# Altium footprint library Footprint-Lib-PhilsLab.PcbLib: 352 footprints (part 21 of 22)
Each footprint in its own frame and in the unit in brackets; x right, y up, seen from the top. Pads: shape width x height; smd on the part's side, far side on the other; paste and mask are expansions set on the pad; w line width, h text height; cw(c..) or ccw(c..) is an arc to the next point about the centre after c.
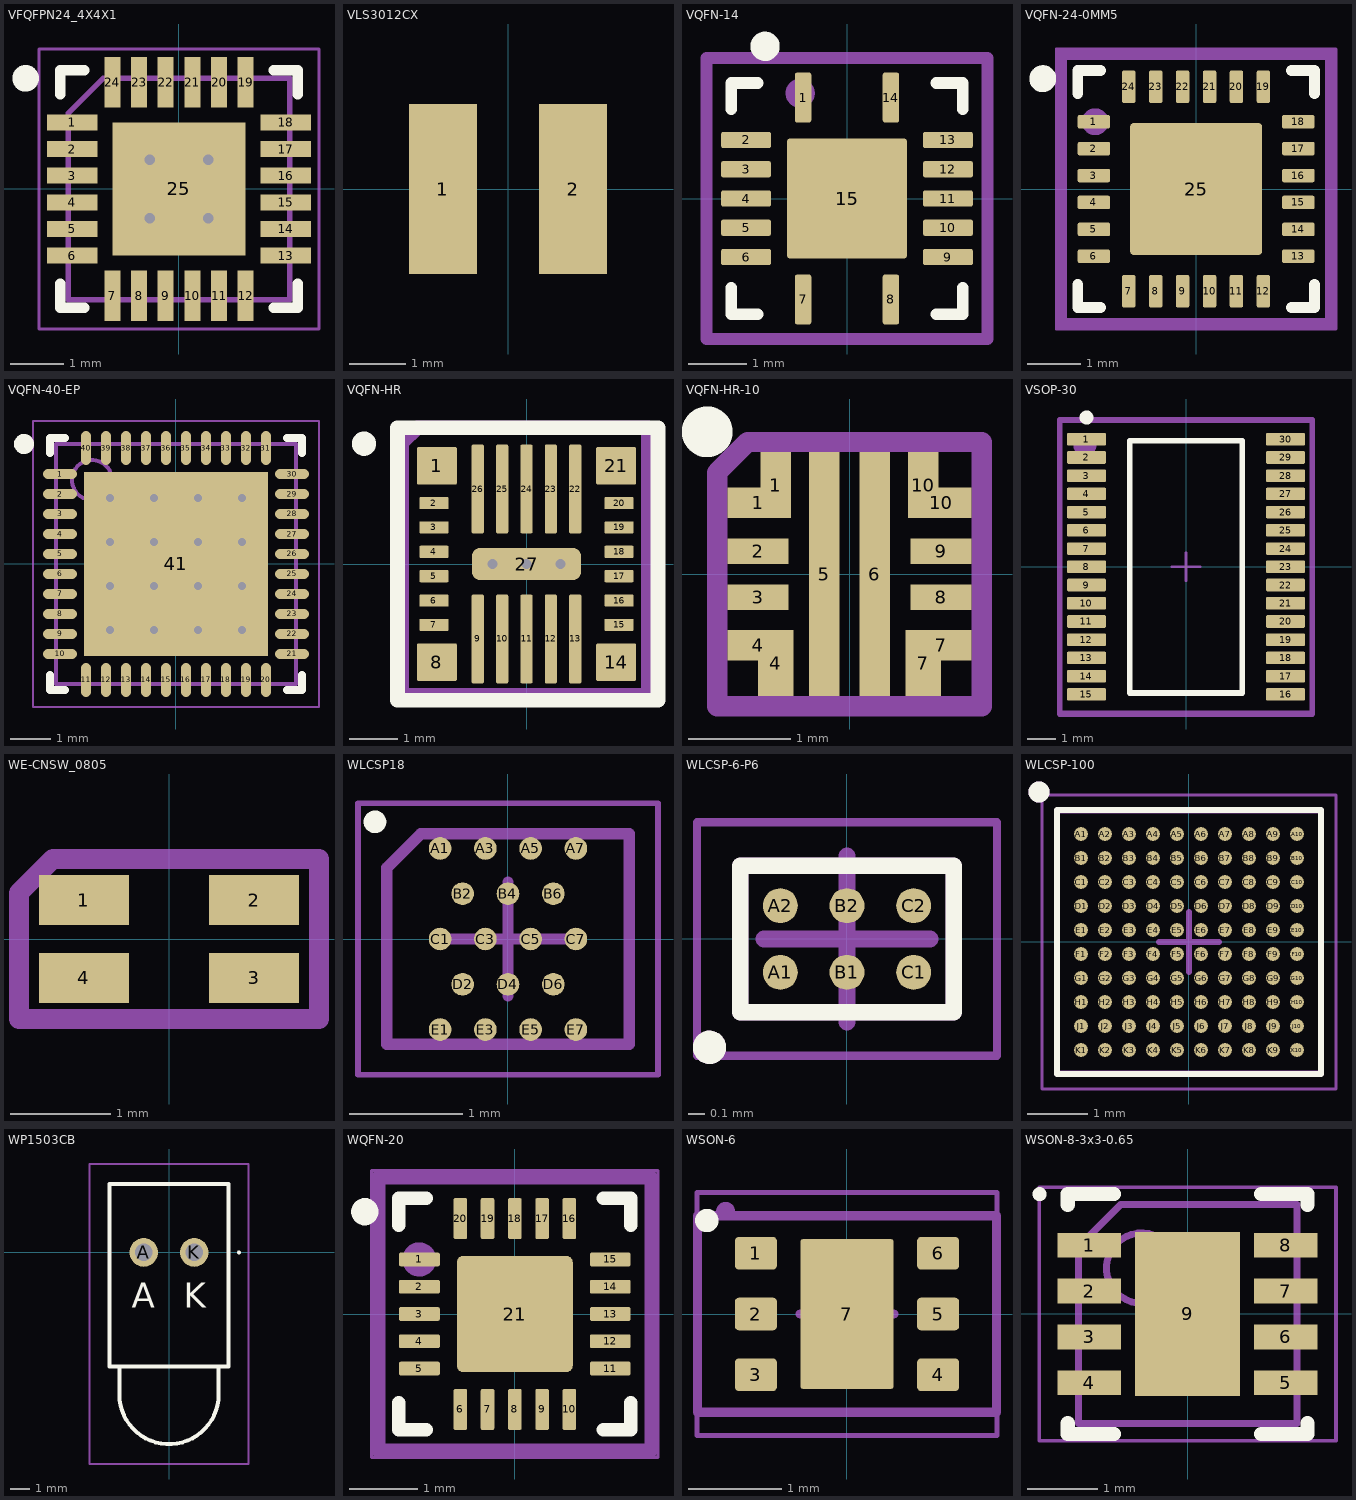
[diagram p20: the footprints below, top view; thin cyan lines are the x and y axes]

## VFQFPN24_4X4X1 [mm] "QFN, 24-Leads, Body 4,00x4,00mm, Pitch 0,50mm, Thermal Pad 2,50x2,50mm, IPC Medium Density"
height 1
pads (25):
  rect 0.95x0.3 smd mask+0.07: 1(-2,1.25) 2(-2,0.75) 3(-2,0.25) 4(-2,-0.25) 5(-2,-0.75) 6(-2,-1.25) 13(2,-1.25) 14(2,-0.75) 15(2,-0.25) 16(2,0.25) 17(2,0.75) 18(2,1.25)
  rect 0.3x0.95 smd mask+0.07: 7(-1.25,-2) 8(-0.75,-2) 9(-0.25,-2) 10(0.25,-2) 11(0.75,-2) 12(1.25,-2) 19(1.25,2) 20(0.75,2) 21(0.25,2) 22(-0.25,2) 23(-0.75,2) 24(-1.25,2)
  rect 2.5x2.5 smd mask+0.102: 25(0,0)
via -0.55,0.55 diameter 0.5 hole 0.2
via 0.55,0.55 diameter 0.5 hole 0.2
via -0.55,-0.55 diameter 0.5 hole 0.2
via 0.55,-0.55 diameter 0.5 hole 0.2
Top Overlay:
  circle w0.25: c-2.875,2.075 r0.125
  lines w0.2: -2.225,-1.775 -2.225,-2.225 -1.775,-2.225 ; -2.225,1.775 -2.225,2.225 -1.775,2.225 ; 1.775,-2.225 2.225,-2.225 2.225,-1.775 ; 1.775,2.225 2.225,2.225 2.225,1.775
Mechanical 13:
  lines w0.1: -2.075,-2.075 -2.075,1.425 -1.425,2.075 2.075,2.075 2.075,-2.075 -2.075,-2.075
Mechanical 15:
  lines w0.05: -2.625,-2.625 -2.625,2.625 2.625,2.625 2.625,-2.625 -2.625,-2.625
  lines w0.1: -0.5,0 0.5,0 ; 0,-0.5 0,0.5
3D body "VFQFPN24_4X4X1.step": height 0.99, standoff 0, extent -2.07,-2.07 2.07,2.07

## VLS3012CX [mm]
pads (2):
  rect 1.2x3 smd: 1(-1.15,0) 2(1.15,0)
3D body "vls3012cx-1.step": height 1.21, standoff 0.01, extent -1.502,-1.509 1.502,1.509

## VQFN-14 [mm] "QFN, 14-Leads, Body 3.50x3.50mm, Pitch 0.50mm, Thermal Pad 2.00x2.00mm, IPC Medium Density"
height 1
pads (15):
  rrect25% 0.28x0.85 smd: 1(-0.75,1.725) 7(-0.75,-1.725) 8(0.75,-1.725) 14(0.75,1.725)
  rrect25% 0.85x0.28 smd: 2(-1.725,1) 3(-1.725,0.5) 4(-1.725,0) 5(-1.725,-0.5) 6(-1.725,-1) 9(1.725,-1) 10(1.725,-0.5) 11(1.725,0) 12(1.725,0.5) 13(1.725,1)
  rrect5% 2.05x2.05 smd: 15(0,0)
Top Overlay:
  circle w0.25: c-1.4,2.6 r0.125
  lines w0.2: -1.975,-1.525 -1.975,-1.975 -1.525,-1.975 ; -1.975,1.525 -1.975,1.975 -1.525,1.975 ; 1.525,-1.975 1.975,-1.975 1.975,-1.525 ; 1.525,1.975 1.975,1.975 1.975,1.525
Mechanical 13:
  circle w0.25: c-0.8,1.8 r0.125
  lines w0.2: -2.4,-2.4 -2.4,2.4 2.4,2.4 2.4,-2.4 -2.4,-2.4
  text ".Designator" at -4.998,-0.333 h1
Mechanical 15:
  lines w0.05: -2.375,-2.375 -2.375,2.375 2.375,2.375 2.375,-2.375 -2.375,-2.375
  lines w0.1: -0.5,0 0.5,0 ; 0,-0.5 0,0.5
3D body "SN74LVC125ARGYR.stp": height 0.97, standoff 0, extent -1.75,-1.75 1.75,1.75

## VQFN-24-0MM5 [mm]
height 1
pads (25):
  rrect25% 0.6x0.25 smd mask+0.07: 1(-1.9,1.25) 2(-1.9,0.75) 3(-1.9,0.25) 4(-1.9,-0.25) 5(-1.9,-0.75) 6(-1.9,-1.25) 13(1.9,-1.25) 14(1.9,-0.75) 15(1.9,-0.25) 16(1.9,0.25) 17(1.9,0.75) 18(1.9,1.25)
  rrect25% 0.25x0.6 smd mask+0.07: 7(-1.25,-1.9) 8(-0.75,-1.9) 9(-0.25,-1.9) 10(0.25,-1.9) 11(0.75,-1.9) 12(1.25,-1.9) 19(1.25,1.9) 20(0.75,1.9) 21(0.25,1.9) 22(-0.25,1.9) 23(-0.75,1.9) 24(-1.25,1.9)
  rrect5% 2.45x2.45 smd: 25(0,0)
Top Overlay:
  circle w0.25: c-2.85,2.05 r0.125
  lines w0.2: -2.2,-1.775 -2.2,-2.2 -1.775,-2.2 ; -2.2,1.775 -2.2,2.2 -1.775,2.2 ; 1.775,-2.2 2.2,-2.2 2.2,-1.775 ; 1.775,2.2 2.2,2.2 2.2,1.775
Mechanical 13:
  circle w0.25: c-1.875,1.25 r0.125
  lines w0.2: -2.5,-2.5 -2.5,2.5 2.5,2.5 2.5,-2.5 -2.5,-2.5
  text "'.Designator'" at -5.665,-0.417 h1
Mechanical 15:
  lines w0.05: -2.6,-2.6 -2.6,2.6 2.6,2.6 2.6,-2.6 -2.6,-2.6
  lines w0.1: -0.5,0 0.5,0 ; 0,-0.5 0,0.5
3D body "VQFN-24-0MM5.step": height 1, standoff 0, extent -2.051,-2.051 2.051,2.051

## VQFN-40-EP [mm]
height 0.9
pads (41):
  oval 0.85x0.25 smd mask+0.2: 1(-2.9,2.25) 2(-2.9,1.75) 3(-2.9,1.25) 4(-2.9,0.75) 5(-2.9,0.25) 6(-2.9,-0.25) 7(-2.9,-0.75) 8(-2.9,-1.25) 9(-2.9,-1.75) 10(-2.9,-2.25) 21(2.9,-2.25) 22(2.9,-1.75) 23(2.9,-1.25) 24(2.9,-0.75) 25(2.9,-0.25) 26(2.9,0.25) 27(2.9,0.75) 28(2.9,1.25) 29(2.9,1.75) 30(2.9,2.25)
  oval 0.25x0.85 smd mask+0.2: 11(-2.25,-2.9) 12(-1.75,-2.9) 13(-1.25,-2.9) 14(-0.75,-2.9) 15(-0.25,-2.9) 16(0.25,-2.9) 17(0.75,-2.9) 18(1.25,-2.9) 19(1.75,-2.9) 20(2.25,-2.9) 31(2.25,2.9) 32(1.75,2.9) 33(1.25,2.9) 34(0.75,2.9) 35(0.25,2.9) 36(-0.25,2.9) 37(-0.75,2.9) 38(-1.25,2.9) 39(-1.75,2.9) 40(-2.25,2.9)
  rect 4.6x4.6 smd mask+0.2: 41(0,0)
via 1.65,-1.65 diameter 0.5 hole 0.2
via 0.55,-1.65 diameter 0.5 hole 0.2
via -0.55,-1.65 diameter 0.5 hole 0.2
via -1.65,-1.65 diameter 0.5 hole 0.2
via 1.65,-0.55 diameter 0.5 hole 0.2
via 0.55,-0.55 diameter 0.5 hole 0.2
via -0.55,-0.55 diameter 0.5 hole 0.2
via -1.65,-0.55 diameter 0.5 hole 0.2
via 1.65,0.55 diameter 0.5 hole 0.2
via 0.55,0.55 diameter 0.5 hole 0.2
via -0.55,0.55 diameter 0.5 hole 0.2
via -1.65,0.55 diameter 0.5 hole 0.2
via 1.65,1.65 diameter 0.5 hole 0.2
via 0.55,1.65 diameter 0.5 hole 0.2
via -0.55,1.65 diameter 0.5 hole 0.2
via -1.65,1.65 diameter 0.5 hole 0.2
Top Overlay:
  circle w0.25: c-3.8,3 r0.125
  lines w0.2: -3.15,-2.775 -3.15,-3.15 -2.775,-3.15 ; -3.15,2.775 -3.15,3.15 -2.775,3.15 ; 2.775,-3.15 3.15,-3.15 3.15,-2.775 ; 2.775,3.15 3.15,3.15 3.15,2.775
Mechanical 13:
  circle w0.1: c-2.1,2.1 r0.5
  lines w0.1: -3,-3 3,-3 3,3 -3,3 -3,-3
  text "'.Designator'" at -6.315,-1.4 h1
Mechanical 15:
  lines w0.05: -3.575,-3.575 3.575,-3.575 3.575,3.575 -3.575,3.575 -3.575,-3.575
  lines w0.1: -0.5,0 0.5,0 ; 0,-0.5 0,0.5
3D body "VQFN-40-EP.step": height 0.9, standoff 0, extent -3.001,-3.001 3.001,3.001

## VQFN-HR [mm]
pads (27):
  rrect10% 0.825x0.775 smd mask+0.07: 1(-1.84,2.015) 8(-1.84,-2.015) 14(1.84,-2.015) 21(1.84,2.015)
  rrect20% 0.6x0.25 smd mask+0.07: 2(-1.9,1.25) 3(-1.9,0.75) 4(-1.9,0.25) 5(-1.9,-0.25) 6(-1.9,-0.75) 7(-1.9,-1.25) 15(1.9,-1.25) 16(1.9,-0.75) 17(1.9,-0.25) 18(1.9,0.25) 19(1.9,0.75) 20(1.9,1.25)
  rrect20% 0.25x1.82 smd mask+0.07: 9(-1,-1.54) 10(-0.5,-1.54) 11(0,-1.54) 12(0.5,-1.54) 13(1,-1.54) 22(1,1.54) 23(0.5,1.54) 24(0,1.54) 25(-0.5,1.54) 26(-1,1.54)
  rrect50% 2.24x0.66 smd mask+0.07: 27(0,0)
via 0,0 diameter 0.5 hole 0.2
via -0.7,0 diameter 0.5 hole 0.2
via 0.7,0 diameter 0.5 hole 0.2
Top Overlay:
  circle w0.254: c-3.339,2.47 r0.121
  lines w0.3: -2.65,-2.8 -2.65,2.8 2.7,2.8 2.7,-2.8 -2.65,-2.8
Mechanical 13:
  circle w0.254: c-1.85,2.021 r0.117
  lines w0.3: -2.559,-2.7 -2.559,2.487 -2.247,2.8 2.5,2.8 2.5,-2.7 -2.559,-2.7
  text "'.Designator'" at -5.84,-0.925 h1
3D body "VQFN-HR.stp": height 0.9, standoff 0, extent -2,-2.25 2,2.25

## VQFN-HR-10 [mm]
pads (14):
  rect 0.6x0.3 smd: 1(-0.9,0.7) 4(-0.9,-0.7) 7(0.9,-0.7) 10(0.9,0.7)
  rect 0.3x0.65 smd: 1(-0.725,0.875) 10(0.725,0.875)
  rect 0.6x0.25 smd: 2(-0.9,0.225) 3(-0.9,-0.225) 8(0.9,-0.225) 9(0.9,0.225)
  rect 0.35x0.65 smd: 4(-0.725,-0.875) 7(0.725,-0.875)
  rect 0.3x2.4 smd: 5(-0.25,0) 6(0.25,0)
Top Overlay:
  circle w0.3: c-1.4,1.4 r0.1
Mechanical 13:
  lines w0.2: -1.3,-1.3 1.3,-1.3 1.3,1.3 -1,1.3 -1.3,1 -1.3,0.2 -1.3,-1.3
  text "'.Designator'" at -6.315,-1.4 h1
3D body "VQFN-HR-10P.STEP": height 1.01, standoff -0.01, extent -1.05,-1.05 1.05,1.05

## VSOP-30 [mm]
height 1.3
pads (30):
  rrect25% 1.4x0.45 smd mask+0.15: 1(-3.55,4.55) 2(-3.55,3.9) 3(-3.55,3.25) 4(-3.55,2.6) 5(-3.55,1.95) 6(-3.55,1.3) 7(-3.55,0.65) 8(-3.55,0) 9(-3.55,-0.65) 10(-3.55,-1.3) 11(-3.55,-1.95) 12(-3.55,-2.6) 13(-3.55,-3.25) 14(-3.55,-3.9) 15(-3.55,-4.55) 16(3.55,-4.55) 17(3.55,-3.9) 18(3.55,-3.25) 19(3.55,-2.6) 20(3.55,-1.95) 21(3.55,-1.3) 22(3.55,-0.65) 23(3.55,0) 24(3.55,0.65) 25(3.55,1.3) 26(3.55,1.95) 27(3.55,2.6) 28(3.55,3.25) 29(3.55,3.9) 30(3.55,4.55)
Top Overlay:
  circle w0.25: c-3.55,5.325 r0.125
  lines w0.2: -2,-4.5 2,-4.5 2,4.5 -2,4.5 -2,-4.5
Mechanical 13:
  circle w0.5: c-3.608,4.351 r0.16
  lines w0.2: -4.5,-5.25 4.5,-5.25 4.5,5.25 -4.5,5.25 -4.5,-5.25
  text "'.Designator'" at -5.815,-0.9 h1
Mechanical 15:
  lines w0.05: -4.5,-5.15 4.5,-5.15 4.5,5.15 -4.5,5.15 -4.5,-5.15
  lines w0.1: -0.5,0 0.5,0 ; 0,-0.5 0,0.5
3D body "VSOP-30.step": height 1.3, standoff 0, extent -3.8,-4.9 3.8,4.9

## WE-CNSW_0805 [mm]
pads (4):
  rect 0.9x0.5 smd mask+0.05: 1(-0.85,0.39) 2(0.85,0.39) 3(0.85,-0.39) 4(-0.85,-0.39)
Mechanical 13:
  lines w0.2: -1.5,-0.8 -1.5,0.462 -1.162,0.8 1.5,0.8 1.5,-0.8 -1.5,-0.8
  text "'.Designator'" at -5.815,-0.9 h1
3D body "WE-CNSW_0805.stp": height 1.21, standoff 0.01, extent -1,-0.6 1,0.6

## WLCSP18 [mm]
height 0.59
pads (18):
  round 0.2 smd mask+0.03: A1(-0.6,0.8) A3(-0.2,0.8) A5(0.2,0.8) A7(0.6,0.8) B2(-0.4,0.4) B4(0,0.4) B6(0.4,0.4) C1(-0.6,0) C3(-0.2,0) C5(0.2,0) C7(0.6,0) D2(-0.4,-0.4) D4(0,-0.4) D6(0.4,-0.4) E1(-0.6,-0.8) E3(-0.2,-0.8) E5(0.2,-0.8) E7(0.6,-0.8)
Top Overlay:
  circle w0.1: c-1.175,1.035 r0.05
Mechanical 13:
  lines w0.1: -1.07,-0.93 -1.07,0.63 -0.77,0.93 1.07,0.93 1.07,-0.93 -1.07,-0.93
  text "'.Designator'" at -5.815,-0.9 h1
Mechanical 15:
  lines w0.05: -1.325,-1.2 1.325,-1.2 1.325,1.2 -1.325,1.2 -1.325,-1.2
  lines w0.1: -0.5,0 0.5,0 ; 0,-0.5 0,0.5
3D body "WLCSP18.step": height 0.59, standoff 0, extent -1.07,-0.93 1.07,0.93

## WLCSP-6-P6 [mm]
height 0.69
pads (6):
  round 0.21 smd mask+0.04: A1(-0.4,-0.2) A2(-0.4,0.2) B1(0,-0.2) B2(0,0.2) C1(0.4,-0.2) C2(0.4,0.2)
Top Overlay:
  circle w0.1: c-0.825,-0.65 r0.05
  lines w0.1: -0.64,-0.44 -0.64,0.44 0.64,0.44 0.64,-0.44 -0.64,-0.44
Mechanical 13:
  circle w0.1: c-0.825,-0.65 r0.05
  lines w0.1: -0.64,-0.44 0.64,-0.44 0.64,0.44 -0.64,0.44 -0.64,-0.44
  text "'.Designator'" at -5.665,-0.417 h1
Mechanical 15:
  lines w0.05: -0.9,-0.7 0.9,-0.7 0.9,0.7 -0.9,0.7 -0.9,-0.7
  lines w0.1: -0.5,0 0.5,0 ; 0,-0.5 0,0.5
3D body "WLCSP-6-P6.step": height 0.69, standoff 0, extent -0.64,-0.44 0.64,0.44

## WLCSP-100 [mm]
height 0.59
pads (100):
  round 0.23 smd mask+0.03: A1(-1.8,1.8) A2(-1.4,1.8) A3(-1,1.8) A4(-0.6,1.8) A5(-0.2,1.8) A6(0.2,1.8) A7(0.6,1.8) A8(1,1.8) A9(1.4,1.8) A10(1.8,1.8) B1(-1.8,1.4) B2(-1.4,1.4) B3(-1,1.4) B4(-0.6,1.4) B5(-0.2,1.4) B6(0.2,1.4) B7(0.6,1.4) B8(1,1.4) B9(1.4,1.4) B10(1.8,1.4) C1(-1.8,1) C2(-1.4,1) C3(-1,1) C4(-0.6,1) C5(-0.2,1) C6(0.2,1) C7(0.6,1) C8(1,1) C9(1.4,1) C10(1.8,1) D1(-1.8,0.6) D2(-1.4,0.6) D3(-1,0.6) D4(-0.6,0.6) D5(-0.2,0.6) D6(0.2,0.6) D7(0.6,0.6) D8(1,0.6) D9(1.4,0.6) D10(1.8,0.6) E1(-1.8,0.2) E2(-1.4,0.2) E3(-1,0.2) E4(-0.6,0.2) E5(-0.2,0.2) E6(0.2,0.2) E7(0.6,0.2) E8(1,0.2) E9(1.4,0.2) E10(1.8,0.2) F1(-1.8,-0.2) F2(-1.4,-0.2) F3(-1,-0.2) F4(-0.6,-0.2) F5(-0.2,-0.2) F6(0.2,-0.2) F7(0.6,-0.2) F8(1,-0.2) F9(1.4,-0.2) F10(1.8,-0.2) G1(-1.8,-0.6) G2(-1.4,-0.6) G3(-1,-0.6) G4(-0.6,-0.6) G5(-0.2,-0.6) G6(0.2,-0.6) G7(0.6,-0.6) G8(1,-0.6) G9(1.4,-0.6) G10(1.8,-0.6) H1(-1.8,-1) H2(-1.4,-1) H3(-1,-1) H4(-0.6,-1) H5(-0.2,-1) H6(0.2,-1) H7(0.6,-1) H8(1,-1) H9(1.4,-1) H10(1.8,-1) J1(-1.8,-1.4) J2(-1.4,-1.4) J3(-1,-1.4) J4(-0.6,-1.4) J5(-0.2,-1.4) J6(0.2,-1.4) J7(0.6,-1.4) J8(1,-1.4) J9(1.4,-1.4) J10(1.8,-1.4) K1(-1.8,-1.8) K2(-1.4,-1.8) K3(-1,-1.8) K4(-0.6,-1.8) K5(-0.2,-1.8) K6(0.2,-1.8) K7(0.6,-1.8) K8(1,-1.8) K9(1.4,-1.8) K10(1.8,-1.8)
Top Overlay:
  circle w0.25: c-2.5,2.5 r0.05
  lines w0.1: -2.2,-2.2 -2.2,2.2 2.2,2.2 2.2,-2.2 -2.2,-2.2
Mechanical 13:
  circle w0.25: c-2.5,2.5 r0.05
  lines w0.1: -2.2,-2.19 2.2,-2.19 2.2,2.19 -2.2,2.19 -2.2,-2.19
  text ".Designator" at -4.998,-0.333 h1
Mechanical 15:
  lines w0.05: -2.45,-2.45 2.45,-2.45 2.45,2.45 -2.45,2.45 -2.45,-2.45
  lines w0.1: -0.5,0 0.5,0 ; 0,-0.5 0,0.5
3D body "WLCSP-100.step": height 0.59, standoff 0, extent -2.2,-2.19 2.2,2.19

## WP1503CB [mm]
pads (2):
  round 1.445 hole 0.889: A(-1.27,0) K(1.27,0)
Top Overlay:
  lines w0.1: 3.47,0 cw(c3.52,0) 3.57,0 cw(c3.52,0) 3.47,0
  lines w0.2: -2.5,-5.75 -2.5,-7.15 ccw(c0,-7.15) 2.5,-7.15 2.5,-5.75 ; -3,-5.75 -3,3.45 3,3.45 3,-5.75 -3,-5.75
  text "A" at -1.867,-2.775 h1.25
  text "K" at 0.733,-2.775 h1.25
Mechanical 13:
  lines w0.1: -2.5,-5.75 -2.5,-7.15 ccw(c0,-7.15) 2.5,-7.15 2.5,-5.75 ; -3,-5.75 -3,3.45 3,3.45 3,-5.75 -3,-5.75
  text "'.Designator'" at -7.231,-0.987 h1.25
Mechanical 15:
  lines w0.1: -4,-10.65 -4,4.45 4,4.45 4,-10.65 -4,-10.65
3D body "1503CB.STEP": height 6.01, standoff -3.49, extent -3,-9.75 3,3.45

## WQFN-20 [mm]
height 0.8
pads (21):
  rrect25% 0.6x0.2 smd mask+0.05: 1(-1.4,0.8) 2(-1.4,0.4) 3(-1.4,0) 4(-1.4,-0.4) 5(-1.4,-0.8) 11(1.4,-0.8) 12(1.4,-0.4) 13(1.4,0) 14(1.4,0.4) 15(1.4,0.8)
  rrect25% 0.2x0.6 smd mask+0.05: 6(-0.8,-1.4) 7(-0.4,-1.4) 8(0,-1.4) 9(0.4,-1.4) 10(0.8,-1.4) 16(0.8,1.4) 17(0.4,1.4) 18(0,1.4) 19(-0.4,1.4) 20(-0.8,1.4)
  rrect10% 1.7x1.7 smd mask+0.05: 21(0,0)
Top Overlay:
  circle w0.2: c-2.2,1.5 r0.1
  lines w0.2: -1.7,-1.3 -1.7,-1.7 -1.3,-1.7 ; -1.7,1.3 -1.7,1.7 -1.3,1.7 ; 1.3,-1.7 1.7,-1.7 1.7,-1.3 ; 1.3,1.7 1.7,1.7 1.7,1.3
Mechanical 13:
  circle w0.3: c-1.4,0.8 r0.1
  lines w0.2: -2,-2 -2,2 2,2 2,-2 -2,-2
  text "'.Designator'" at -5.665,-0.417 h1
Mechanical 15:
  lines w0.05: -2.1,-2.1 -2.1,2.1 2.1,2.1 2.1,-2.1 -2.1,-2.1
  lines w0.1: -0.5,0 0.5,0 ; 0,-0.5 0,0.5
3D body "WQFN-20.step": height 0.8, standoff 0, extent -1.551,-1.551 1.551,1.551

## WSON-6 [mm]
height 0.8
pads (7):
  rrect25% 0.45x0.35 smd mask+0.07: 1(-0.975,0.65) 2(-0.975,0) 3(-0.975,-0.65) 4(0.975,-0.65) 5(0.975,0) 6(0.975,0.65)
  rrect5% 1x1.6 smd mask+0.07: 7(0,0)
Top Overlay:
  circle w0.15: c-1.5,1 r0.05
Mechanical 13:
  circle w0.1: c-1.3,1.1 r0.05
  lines w0.1: -1.6,-1.05 1.6,-1.05 1.6,1.05 -1.6,1.05 -1.6,-1.05
  text "'.Designator'" at -5.665,-0.417 h1
Mechanical 15:
  lines w0.05: -1.605,-1.3 1.605,-1.3 1.605,1.3 -1.605,1.3 -1.605,-1.3
  lines w0.1: -0.5,0 0.5,0 ; 0,-0.5 0,0.5
3D body "WSON-6.step": height 0.8, standoff 0, extent -1.13,-1.05 1.13,1.05

## WSON-8-3x3-0.65 [mm] "SON, 8-Leads, Body 3.00x3.00mm, Pitch 0.65mm, Thermal Pad 2.33x1.49mm, IPC Medium Density"
height 1
pads (9):
  rect 0.9x0.35 smd: 1(-1.395,0.975) 2(-1.395,0.325) 3(-1.395,-0.325) 4(-1.395,-0.975) 5(1.395,-0.975) 6(1.395,-0.325) 7(1.395,0.325) 8(1.395,0.975)
  rect 1.49x2.33 smd: 9(0,0)
Top Overlay:
  circle w0.1: c-2.1,1.7 r0.05
  lines w0.2: -1.7,-1.55 -1.7,-1.7 -1.045,-1.7 ; -1.7,1.55 -1.7,1.7 -1.045,1.7 ; 1.045,-1.7 1.7,-1.7 1.7,-1.55 ; 1.045,1.7 1.7,1.7 1.7,1.55
Mechanical 13:
  circle w0.1: c-0.65,0.65 r0.5
  lines w0.1: -1.55,-1.55 -1.55,0.95 -0.95,1.55 1.55,1.55 1.55,-1.55 -1.55,-1.55
  text "'.Designator'" at -5.665,-0.317 h1
Mechanical 15:
  lines w0.05: -2.105,-1.8 2.105,-1.8 2.105,1.8 -2.105,1.8 -2.105,-1.8
  lines w0.1: -0.5,0 0.5,0 ; 0,-0.5 0,0.5
3D body "WSON-8-3x3-0.65.step": height 1, standoff 0, extent -1.551,-1.55 1.551,1.55